# Altium footprint library Miscellaneous Connectors.PcbLib: 245 footprints (part 13 of 16)
Each footprint in its own frame and in the unit in brackets; x right, y up, seen from the top. Pads: shape width x height; smd on the part's side, far side on the other; paste and mask are expansions set on the pad; w line width, h text height; cw(c..) or ccw(c..) is an arc to the next point about the centre after c.
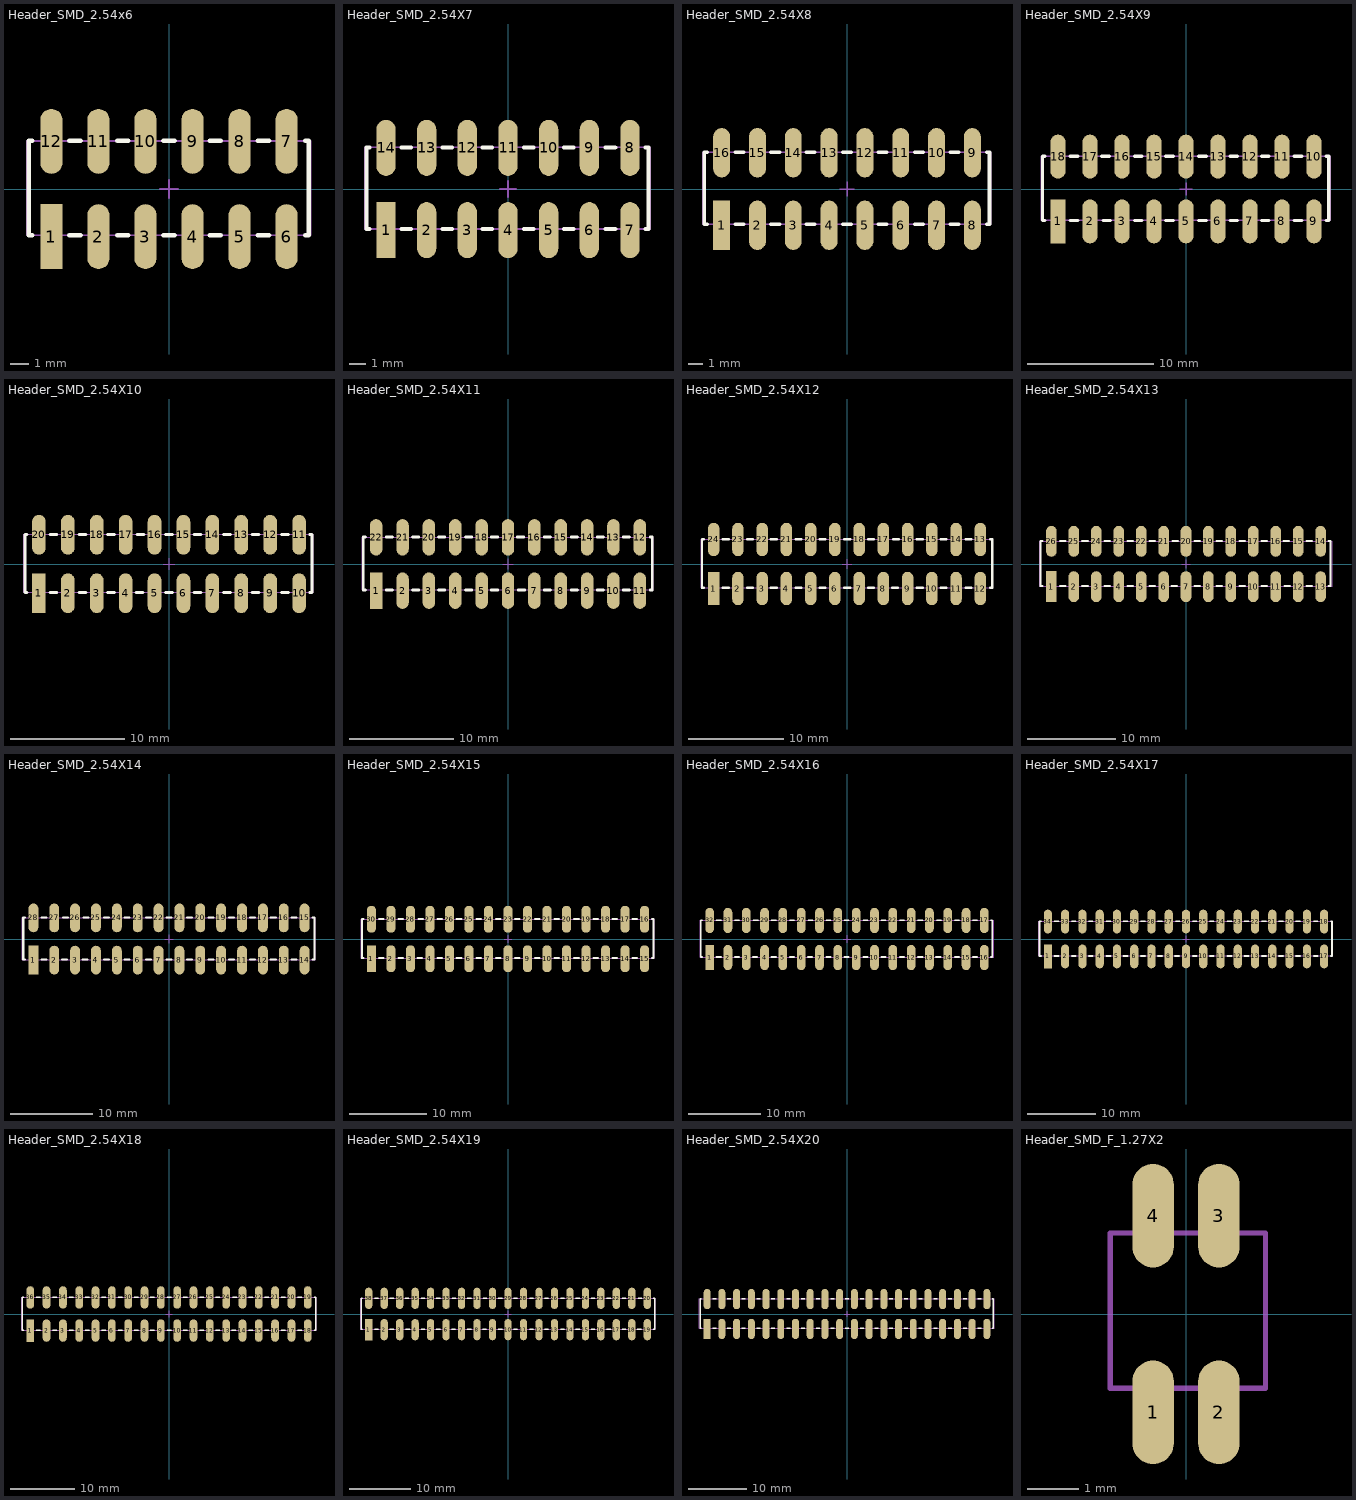
[diagram p12: the footprints below, top view; thin cyan lines are the x and y axes]

## Header_SMD_2.54x6 [mm]
pads (12):
  rect 1.2x3.5 smd: 1(-6.35,-2.57)
  oval 1.2x3.5 smd: 2(-3.81,-2.57) 3(-1.27,-2.57) 4(1.27,-2.57) 5(3.81,-2.57) 6(6.35,-2.57) 7(6.35,2.57) 8(3.81,2.57) 9(1.27,2.57) 10(-1.27,2.57) 11(-3.81,2.57) 12(-6.35,2.57)
Top Overlay:
  lines w0.254: -7.38,-2.5 -7.58,-2.5 ; -7.38,2.6 -7.58,2.6 ; -5.38,-2.5 -4.78,-2.5 ; -5.38,2.6 -4.78,2.6 ; -2.8,-2.5 -2.2,-2.5 ; -2.8,2.6 -2.2,2.6 ; -0.3,-2.5 0.3,-2.5 ; -0.3,2.6 0.3,2.6 ; 2.2,-2.5 2.8,-2.5 ; 2.2,2.6 2.8,2.6 ; 4.8,-2.5 5.4,-2.5 ; 4.8,2.6 5.4,2.6 ; 7.35,-2.5 7.55,-2.5 7.55,2.6 7.35,2.6 ; -7.58,-2.5 -7.58,-2.5 ; -7.58,-2.5 -7.58,2.6 ; -7.58,2.6 -7.58,2.6
Mechanical 15:
  lines w0.1: -0.5,0 0.5,0 ; 0,-0.5 0,0.5 ; -7.68,-2.5 -7.68,2.6 7.65,2.6 7.65,-2.5 -7.68,-2.5
3D body: height 9.7, standoff -0.04, extent -7.66,-3.75 7.58,3.75

## Header_SMD_2.54X7 [mm]
pads (14):
  rect 1.2x3.5 smd: 1(-7.62,-2.57)
  oval 1.2x3.5 smd: 2(-5.08,-2.57) 3(-2.54,-2.57) 4(0,-2.57) 5(2.54,-2.57) 6(5.08,-2.57) 7(7.62,-2.57) 8(7.62,2.57) 9(5.08,2.57) 10(2.54,2.57) 11(0,2.57) 12(-2.54,2.57) 13(-5.08,2.57) 14(-7.62,2.57)
Top Overlay:
  lines w0.254: -8.65,-2.5 -8.85,-2.5 ; -8.65,2.6 -8.85,2.6 ; -6.65,-2.5 -6.05,-2.5 ; -6.65,2.6 -6.05,2.6 ; -4.1,-2.5 -3.5,-2.5 ; -4.1,2.6 -3.5,2.6 ; -1.6,-2.5 -1,-2.5 ; -1.6,2.6 -1,2.6 ; 1,-2.5 1.6,-2.5 ; 1,2.6 1.6,2.6 ; 3.5,-2.5 4.1,-2.5 ; 3.5,2.6 4.1,2.6 ; 6.1,-2.5 6.7,-2.5 ; 6.1,2.6 6.7,2.6 ; 8.58,-2.5 8.78,-2.5 8.78,2.6 8.58,2.6 ; -8.85,-2.5 -8.85,-2.5 ; -8.85,-2.5 -8.85,2.6 ; -8.85,2.6 -8.85,2.6
Mechanical 15:
  lines w0.1: -0.5,0 0.5,0 ; 0,-0.5 0,0.5 ; -8.95,-2.5 -8.95,2.6 8.88,2.6 8.88,-2.5 -8.95,-2.5
3D body: height 9.7, standoff -0.04, extent -8.93,-3.75 8.85,3.75

## Header_SMD_2.54X8 [mm]
pads (16):
  rect 1.2x3.5 smd: 1(-8.89,-2.57)
  oval 1.2x3.5 smd: 2(-6.35,-2.57) 3(-3.81,-2.57) 4(-1.27,-2.57) 5(1.27,-2.57) 6(3.81,-2.57) 7(6.35,-2.57) 8(8.89,-2.57) 9(8.89,2.57) 10(6.35,2.57) 11(3.81,2.57) 12(1.27,2.57) 13(-1.27,2.57) 14(-3.81,2.57) 15(-6.35,2.57) 16(-8.89,2.57)
Top Overlay:
  lines w0.254: -9.92,-2.5 -10.12,-2.5 ; -9.92,2.6 -10.12,2.6 ; -7.92,-2.5 -7.32,-2.5 ; -7.92,2.6 -7.32,2.6 ; -5.39,-2.5 -4.79,-2.5 ; -5.39,2.6 -4.79,2.6 ; -2.89,-2.5 -2.29,-2.5 ; -2.89,2.6 -2.29,2.6 ; -0.29,-2.5 0.31,-2.5 ; -0.29,2.6 0.31,2.6 ; 2.21,-2.5 2.81,-2.5 ; 2.21,2.6 2.81,2.6 ; 4.81,-2.5 5.41,-2.5 ; 4.81,2.6 5.41,2.6 ; 7.31,-2.5 7.91,-2.5 ; 7.31,2.6 7.91,2.6 ; 9.91,-2.5 10.11,-2.5 10.11,2.6 9.91,2.6 ; -10.12,-2.5 -10.12,-2.5 ; -10.12,-2.5 -10.12,2.6 ; -10.12,2.6 -10.12,2.6
Mechanical 15:
  lines w0.1: -0.5,0 0.5,0 ; 0,-0.5 0,0.5 ; -10.22,-2.5 -10.22,2.6 10.21,2.6 10.21,-2.5 -10.22,-2.5
3D body: height 9.7, standoff -0.04, extent -10.2,-3.75 10.12,3.75

## Header_SMD_2.54X9 [mm]
pads (18):
  rect 1.2x3.5 smd: 1(-10.16,-2.57)
  oval 1.2x3.5 smd: 2(-7.62,-2.57) 3(-5.08,-2.57) 4(-2.54,-2.57) 5(0,-2.57) 6(2.54,-2.57) 7(5.08,-2.57) 8(7.62,-2.57) 9(10.16,-2.57) 10(10.16,2.57) 11(7.62,2.57) 12(5.08,2.57) 13(2.54,2.57) 14(0,2.57) 15(-2.54,2.57) 16(-5.08,2.57) 17(-7.62,2.57) 18(-10.16,2.57)
Top Overlay:
  lines w0.254: -11.19,-2.5 -11.39,-2.5 ; -11.19,2.6 -11.39,2.6 ; -9.19,-2.5 -8.59,-2.5 ; -9.19,2.6 -8.59,2.6 ; -6.7,2.6 -6.1,2.6 ; -6.6,-2.5 -6,-2.5 ; -4.1,-2.5 -3.5,-2.5 ; -4.1,2.6 -3.5,2.6 ; -1.6,-2.5 -1,-2.5 ; -1.6,2.6 -1,2.6 ; 1,-2.5 1.6,-2.5 ; 1,2.6 1.6,2.6 ; 3.5,-2.5 4.1,-2.5 ; 3.5,2.6 4.1,2.6 ; 6,-2.5 6.6,-2.5 ; 6,2.6 6.6,2.6 ; 8.6,-2.5 9.2,-2.5 ; 8.6,2.6 9.2,2.6 ; 11.14,-2.5 11.34,-2.5 11.34,2.6 11.14,2.6 ; -11.39,-2.5 -11.39,-2.5 ; -11.39,-2.5 -11.39,2.6 ; -11.39,2.6 -11.39,2.6
Mechanical 15:
  lines w0.1: -0.5,0 0.5,0 ; 0,-0.5 0,0.5 ; -11.49,-2.5 -11.49,2.6 11.44,2.6 11.44,-2.5 -11.49,-2.5
3D body: height 9.7, standoff -0.04, extent -11.47,-3.75 11.39,3.75

## Header_SMD_2.54X10 [mm]
pads (20):
  rect 1.2x3.5 smd: 1(-11.43,-2.57)
  oval 1.2x3.5 smd: 2(-8.89,-2.57) 3(-6.35,-2.57) 4(-3.81,-2.57) 5(-1.27,-2.57) 6(1.27,-2.57) 7(3.81,-2.57) 8(6.35,-2.57) 9(8.89,-2.57) 10(11.43,-2.57) 11(11.43,2.57) 12(8.89,2.57) 13(6.35,2.57) 14(3.81,2.57) 15(1.27,2.57) 16(-1.27,2.57) 17(-3.81,2.57) 18(-6.35,2.57) 19(-8.89,2.57) 20(-11.43,2.57)
Top Overlay:
  lines w0.254: -12.46,-2.5 -12.66,-2.5 ; -12.46,2.6 -12.66,2.6 ; -10.46,-2.5 -9.86,-2.5 ; -10.46,2.6 -9.86,2.6 ; -7.9,-2.5 -7.3,-2.5 ; -7.9,2.6 -7.3,2.6 ; -5.4,-2.5 -4.8,-2.5 ; -5.4,2.6 -4.8,2.6 ; -2.9,-2.5 -2.3,-2.5 ; -2.8,2.6 -2.2,2.6 ; -0.3,-2.5 0.3,-2.5 ; -0.3,2.6 0.3,2.6 ; 2.2,-2.5 2.8,-2.5 ; 2.2,2.6 2.8,2.6 ; 4.8,-2.5 5.4,-2.5 ; 4.8,2.6 5.4,2.6 ; 7.3,-2.5 7.9,-2.5 ; 7.3,2.6 7.9,2.6 ; 9.9,-2.5 10.5,-2.5 ; 9.9,2.6 10.5,2.6 ; 12.37,-2.5 12.57,-2.5 12.57,2.6 12.37,2.6 ; -12.66,-2.5 -12.66,2.6 ; -12.66,-2.5 -12.66,-2.5 ; -12.66,2.6 -12.66,2.6
Mechanical 15:
  lines w0.1: -0.5,0 0.5,0 ; 0,-0.5 0,0.5 ; -12.76,-2.5 12.67,-2.5 12.67,2.6 -12.76,2.6 -12.76,-2.5
3D body: height 9.7, standoff -0.04, extent -12.74,-3.75 12.66,3.75

## Header_SMD_2.54X11 [mm]
pads (22):
  rect 1.2x3.5 smd: 1(-12.7,-2.57)
  oval 1.2x3.5 smd: 2(-10.16,-2.57) 3(-7.62,-2.57) 4(-5.08,-2.57) 5(-2.54,-2.57) 6(0,-2.57) 7(2.54,-2.57) 8(5.08,-2.57) 9(7.62,-2.57) 10(10.16,-2.57) 11(12.7,-2.57) 12(12.7,2.57) 13(10.16,2.57) 14(7.62,2.57) 15(5.08,2.57) 16(2.54,2.57) 17(0,2.57) 18(-2.54,2.57) 19(-5.08,2.57) 20(-7.62,2.57) 21(-10.16,2.57) 22(-12.7,2.57)
Top Overlay:
  lines w0.254: -13.73,-2.5 -13.93,-2.5 ; -13.73,2.6 -13.93,2.6 ; -11.73,-2.5 -11.13,-2.5 ; -11.73,2.6 -11.13,2.6 ; -9.2,-2.5 -8.6,-2.5 ; -9.2,2.6 -8.6,2.6 ; -6.7,-2.5 -6.1,-2.5 ; -6.7,2.6 -6.1,2.6 ; -4.1,-2.5 -3.5,-2.5 ; -4.1,2.6 -3.5,2.6 ; -1.6,-2.5 -1,-2.5 ; -1.6,2.6 -1,2.6 ; 0.9,2.6 1.5,2.6 ; 1,-2.5 1.6,-2.5 ; 3.5,-2.5 4.1,-2.5 ; 3.5,2.6 4.1,2.6 ; 6.1,-2.5 6.7,-2.5 ; 6.1,2.6 6.7,2.6 ; 8.6,-2.5 9.2,-2.5 ; 8.6,2.6 9.2,2.6 ; 11.1,-2.5 11.7,-2.5 ; 11.1,2.6 11.7,2.6 ; 13.7,-2.5 13.9,-2.5 13.9,2.6 13.7,2.6 ; -13.93,-2.5 -13.93,-2.5 ; -13.93,-2.5 -13.93,2.6 ; -13.93,2.6 -13.93,2.6
Mechanical 15:
  lines w0.1: -0.5,0 0.5,0 ; 0,-0.5 0,0.5 ; -14.03,-2.5 -14.03,2.6 14,2.6 14,-2.5 -14.03,-2.5
3D body: height 9.7, standoff -0.04, extent -14.01,-3.75 13.93,3.75

## Header_SMD_2.54X12 [mm]
pads (24):
  rect 1.2x3.5 smd: 1(-13.97,-2.57)
  oval 1.2x3.5 smd: 2(-11.43,-2.57) 3(-8.89,-2.57) 4(-6.35,-2.57) 5(-3.81,-2.57) 6(-1.27,-2.57) 7(1.27,-2.57) 8(3.81,-2.57) 9(6.35,-2.57) 10(8.89,-2.57) 11(11.43,-2.57) 12(13.97,-2.57) 13(13.97,2.57) 14(11.43,2.57) 15(8.89,2.57) 16(6.35,2.57) 17(3.81,2.57) 18(1.27,2.57) 19(-1.27,2.57) 20(-3.81,2.57) 21(-6.35,2.57) 22(-8.89,2.57) 23(-11.43,2.57) 24(-13.97,2.57)
Top Overlay:
  lines w0.254: -15,-2.5 -15.2,-2.5 ; -15,2.6 -15.2,2.6 ; -13,-2.5 -12.4,-2.5 ; -13,2.6 -12.4,2.6 ; -10.47,-2.5 -9.87,-2.5 ; -10.47,2.6 -9.87,2.6 ; -7.97,-2.5 -7.37,-2.5 ; -7.97,2.6 -7.37,2.6 ; -5.37,-2.5 -4.77,-2.5 ; -5.37,2.6 -4.77,2.6 ; -2.87,-2.5 -2.27,-2.5 ; -2.87,2.6 -2.27,2.6 ; -0.27,-2.5 0.33,-2.5 ; -0.27,2.6 0.33,2.6 ; 2.23,-2.5 2.83,-2.5 ; 2.23,2.6 2.83,2.6 ; 4.73,-2.5 5.33,-2.5 ; 4.83,2.6 5.43,2.6 ; 7.33,-2.5 7.93,-2.5 ; 7.33,2.6 7.93,2.6 ; 9.83,-2.5 10.43,-2.5 ; 9.83,2.6 10.43,2.6 ; 12.43,-2.5 13.03,-2.5 ; 12.43,2.6 13.03,2.6 ; 15.03,-2.5 15.23,-2.5 15.23,2.6 15.03,2.6 ; -15.2,-2.5 -15.2,2.6 ; -15.2,-2.5 -15.2,-2.5 ; -15.2,2.6 -15.2,2.6
Mechanical 15:
  lines w0.1: -0.5,0 0.5,0 ; 0,-0.5 0,0.5 ; -15.3,-2.5 15.23,-2.5 15.23,2.6 -15.3,2.6 -15.3,-2.5
3D body: height 9.7, standoff -0.04, extent -15.28,-3.75 15.2,3.75

## Header_SMD_2.54X13 [mm]
pads (26):
  rect 1.2x3.5 smd: 1(-15.24,-2.57)
  oval 1.2x3.5 smd: 2(-12.7,-2.57) 3(-10.16,-2.57) 4(-7.62,-2.57) 5(-5.08,-2.57) 6(-2.54,-2.57) 7(0,-2.57) 8(2.54,-2.57) 9(5.08,-2.57) 10(7.62,-2.57) 11(10.16,-2.57) 12(12.7,-2.57) 13(15.24,-2.57) 14(15.24,2.57) 15(12.7,2.57) 16(10.16,2.57) 17(7.62,2.57) 18(5.08,2.57) 19(2.54,2.57) 20(0,2.57) 21(-2.54,2.57) 22(-5.08,2.57) 23(-7.62,2.57) 24(-10.16,2.57) 25(-12.7,2.57) 26(-15.24,2.57)
Top Overlay:
  lines w0.254: -16.27,-2.5 -16.47,-2.5 ; -16.27,2.6 -16.47,2.6 ; -14.27,-2.5 -13.67,-2.5 ; -14.27,2.6 -13.67,2.6 ; -11.74,-2.5 -11.14,-2.5 ; -11.74,2.6 -11.14,2.6 ; -9.24,-2.5 -8.64,-2.5 ; -9.24,2.6 -8.64,2.6 ; -6.64,-2.5 -6.04,-2.5 ; -6.64,2.6 -6.04,2.6 ; -4.14,-2.5 -3.54,-2.5 ; -4.14,2.6 -3.54,2.6 ; -1.64,-2.5 -1.04,-2.5 ; -1.54,2.6 -0.94,2.6 ; 0.96,-2.5 1.56,-2.5 ; 0.96,2.6 1.56,2.6 ; 3.46,-2.5 4.06,-2.5 ; 3.46,2.6 4.06,2.6 ; 6.06,-2.5 6.66,-2.5 ; 6.06,2.6 6.66,2.6 ; 8.56,-2.5 9.16,-2.5 ; 8.56,2.6 9.16,2.6 ; 11.06,2.6 11.66,2.6 ; 11.16,-2.5 11.76,-2.5 ; 13.66,-2.5 14.26,-2.5 ; 13.66,2.6 14.26,2.6 ; 16.16,-2.5 16.36,-2.5 16.36,2.6 16.16,2.6 ; -16.47,-2.5 -16.47,-2.5 ; -16.47,-2.5 -16.47,2.6 ; -16.47,2.6 -16.47,2.6
Mechanical 15:
  lines w0.1: -0.5,0 0.5,0 ; 0,-0.5 0,0.5 ; -16.57,-2.5 -16.57,2.6 16.56,2.6 16.56,-2.5 -16.57,-2.5
3D body: height 9.7, standoff -0.04, extent -16.55,-3.75 16.47,3.75

## Header_SMD_2.54X14 [mm]
pads (28):
  rect 1.2x3.5 smd: 1(-16.51,-2.57)
  oval 1.2x3.5 smd: 2(-13.97,-2.57) 3(-11.43,-2.57) 4(-8.89,-2.57) 5(-6.35,-2.57) 6(-3.81,-2.57) 7(-1.27,-2.57) 8(1.27,-2.57) 9(3.81,-2.57) 10(6.35,-2.57) 11(8.89,-2.57) 12(11.43,-2.57) 13(13.97,-2.57) 14(16.51,-2.57) 15(16.51,2.57) 16(13.97,2.57) 17(11.43,2.57) 18(8.89,2.57) 19(6.35,2.57) 20(3.81,2.57) 21(1.27,2.57) 22(-1.27,2.57) 23(-3.81,2.57) 24(-6.35,2.57) 25(-8.89,2.57) 26(-11.43,2.57) 27(-13.97,2.57) 28(-16.51,2.57)
Top Overlay:
  lines w0.254: -17.54,-2.5 -17.74,-2.5 ; -17.54,2.6 -17.74,2.6 ; -15.54,-2.5 -14.94,-2.5 ; -15.54,2.6 -14.94,2.6 ; -13.01,-2.5 -12.41,-2.5 ; -12.91,2.6 -12.31,2.6 ; -10.51,-2.5 -9.91,-2.5 ; -10.41,2.6 -9.81,2.6 ; -7.91,-2.5 -7.31,-2.5 ; -7.91,2.6 -7.31,2.6 ; -5.41,-2.5 -4.81,-2.5 ; -5.41,2.6 -4.81,2.6 ; -2.81,-2.5 -2.21,-2.5 ; -2.81,2.6 -2.21,2.6 ; -0.31,-2.5 0.29,-2.5 ; -0.31,2.6 0.29,2.6 ; 2.19,-2.5 2.79,-2.5 ; 2.19,2.6 2.79,2.6 ; 4.79,-2.5 5.39,-2.5 ; 4.79,2.6 5.39,2.6 ; 7.29,-2.5 7.89,-2.5 ; 7.29,2.6 7.89,2.6 ; 9.89,-2.5 10.49,-2.5 ; 9.89,2.6 10.49,2.6 ; 12.39,-2.5 12.99,-2.5 ; 12.39,2.6 12.99,2.6 ; 14.89,-2.5 15.49,-2.5 ; 14.89,2.6 15.49,2.6 ; 17.49,-2.5 17.69,-2.5 17.69,2.6 17.49,2.6 ; -17.74,-2.5 -17.74,-2.5 ; -17.74,-2.5 -17.74,2.6 ; -17.74,2.6 -17.74,2.6
Mechanical 15:
  lines w0.1: -0.5,0 0.5,0 ; 0,-0.5 0,0.5 ; -17.84,-2.5 -17.84,2.6 17.79,2.6 17.79,-2.5 -17.84,-2.5
3D body: height 9.7, standoff -0.04, extent -17.82,-3.75 17.74,3.75

## Header_SMD_2.54X15 [mm]
pads (30):
  rect 1.2x3.5 smd: 1(-17.78,-2.57)
  oval 1.2x3.5 smd: 2(-15.24,-2.57) 3(-12.7,-2.57) 4(-10.16,-2.57) 5(-7.62,-2.57) 6(-5.08,-2.57) 7(-2.54,-2.57) 8(0,-2.57) 9(2.54,-2.57) 10(5.08,-2.57) 11(7.62,-2.57) 12(10.16,-2.57) 13(12.7,-2.57) 14(15.24,-2.57) 15(17.78,-2.57) 16(17.78,2.57) 17(15.24,2.57) 18(12.7,2.57) 19(10.16,2.57) 20(7.62,2.57) 21(5.08,2.57) 22(2.54,2.57) 23(0,2.57) 24(-2.54,2.57) 25(-5.08,2.57) 26(-7.62,2.57) 27(-10.16,2.57) 28(-12.7,2.57) 29(-15.24,2.57) 30(-17.78,2.57)
Top Overlay:
  lines w0.254: -18.81,-2.5 -19.01,-2.5 ; -18.81,2.6 -19.01,2.6 ; -16.81,-2.5 -16.21,-2.5 ; -16.81,2.6 -16.21,2.6 ; -14.28,-2.5 -13.68,-2.5 ; -14.28,2.6 -13.68,2.6 ; -11.78,-2.5 -11.18,-2.5 ; -11.68,2.6 -11.08,2.6 ; -9.18,-2.5 -8.58,-2.5 ; -9.18,2.6 -8.58,2.6 ; -6.68,-2.5 -6.08,-2.5 ; -6.68,2.6 -6.08,2.6 ; -4.08,-2.5 -3.48,-2.5 ; -4.08,2.6 -3.48,2.6 ; -1.58,-2.5 -0.98,-2.5 ; -1.58,2.6 -0.98,2.6 ; 0.92,-2.5 1.52,-2.5 ; 0.92,2.6 1.52,2.6 ; 3.52,-2.5 4.12,-2.5 ; 3.52,2.6 4.12,2.6 ; 6.02,-2.5 6.62,-2.5 ; 6.02,2.6 6.62,2.6 ; 8.62,-2.5 9.22,-2.5 ; 8.62,2.6 9.22,2.6 ; 11.12,-2.5 11.72,-2.5 ; 11.12,2.6 11.72,2.6 ; 13.62,-2.5 14.22,-2.5 ; 13.62,2.6 14.22,2.6 ; 16.22,-2.5 16.82,-2.5 ; 16.22,2.6 16.82,2.6 ; 18.72,-2.5 18.92,-2.5 18.92,2.6 18.72,2.6 ; -19.01,-2.5 -19.01,2.6 ; -19.01,-2.5 -19.01,-2.5 ; -19.01,2.6 -19.01,2.6
Mechanical 15:
  lines w0.1: -0.5,0 0.5,0 ; 0,-0.5 0,0.5 ; -19.11,-2.5 19.02,-2.5 19.02,2.6 -19.11,2.6 -19.11,-2.5
3D body: height 9.7, standoff -0.04, extent -19.09,-3.75 19.01,3.75

## Header_SMD_2.54X16 [mm]
pads (32):
  rect 1.2x3.5 smd: 1(-19.05,-2.57)
  oval 1.2x3.5 smd: 2(-16.51,-2.57) 3(-13.97,-2.57) 4(-11.43,-2.57) 5(-8.89,-2.57) 6(-6.35,-2.57) 7(-3.81,-2.57) 8(-1.27,-2.57) 9(1.27,-2.57) 10(3.81,-2.57) 11(6.35,-2.57) 12(8.89,-2.57) 13(11.43,-2.57) 14(13.97,-2.57) 15(16.51,-2.57) 16(19.05,-2.57) 17(19.05,2.57) 18(16.51,2.57) 19(13.97,2.57) 20(11.43,2.57) 21(8.89,2.57) 22(6.35,2.57) 23(3.81,2.57) 24(1.27,2.57) 25(-1.27,2.57) 26(-3.81,2.57) 27(-6.35,2.57) 28(-8.89,2.57) 29(-11.43,2.57) 30(-13.97,2.57) 31(-16.51,2.57) 32(-19.05,2.57)
Top Overlay:
  lines w0.254: -20.08,-2.5 -20.28,-2.5 ; -20.08,2.6 -20.28,2.6 ; -18.08,-2.5 -17.48,-2.5 ; -18.08,2.6 -17.48,2.6 ; -15.55,-2.5 -14.95,-2.5 ; -15.55,2.6 -14.95,2.6 ; -13.05,-2.5 -12.45,-2.5 ; -12.95,2.6 -12.35,2.6 ; -10.45,-2.5 -9.85,-2.5 ; -10.45,2.6 -9.85,2.6 ; -7.95,-2.5 -7.35,-2.5 ; -7.95,2.6 -7.35,2.6 ; -5.45,-2.5 -4.85,-2.5 ; -5.35,2.6 -4.75,2.6 ; -2.85,-2.5 -2.25,-2.5 ; -2.85,2.6 -2.25,2.6 ; -0.35,-2.5 0.25,-2.5 ; -0.35,2.6 0.25,2.6 ; 2.25,-2.5 2.85,-2.5 ; 2.25,2.6 2.85,2.6 ; 4.75,-2.5 5.35,-2.5 ; 4.75,2.6 5.35,2.6 ; 7.35,-2.5 7.95,-2.5 ; 7.35,2.6 7.95,2.6 ; 9.85,-2.5 10.45,-2.5 ; 9.85,2.6 10.45,2.6 ; 12.35,-2.5 12.95,-2.5 ; 12.45,2.6 13.05,2.6 ; 14.95,-2.5 15.55,-2.5 ; 14.95,2.6 15.55,2.6 ; 17.45,-2.5 18.05,-2.5 ; 17.45,2.6 18.05,2.6 ; 19.95,-2.5 20.15,-2.5 20.15,2.6 19.95,2.6 ; -20.28,-2.5 -20.28,-2.5 ; -20.28,-2.5 -20.28,2.6 ; -20.28,2.6 -20.28,2.6
Mechanical 15:
  lines w0.1: -0.5,0 0.5,0 ; 0,-0.5 0,0.5 ; -20.38,-2.5 -20.38,2.6 20.35,2.6 20.35,-2.5 -20.38,-2.5
3D body: height 9.7, standoff -0.04, extent -20.36,-3.75 20.28,3.75

## Header_SMD_2.54X17 [mm]
pads (34):
  rect 1.2x3.5 smd: 1(-20.32,-2.57)
  oval 1.2x3.5 smd: 2(-17.78,-2.57) 3(-15.24,-2.57) 4(-12.7,-2.57) 5(-10.16,-2.57) 6(-7.62,-2.57) 7(-5.08,-2.57) 8(-2.54,-2.57) 9(0,-2.57) 10(2.54,-2.57) 11(5.08,-2.57) 12(7.62,-2.57) 13(10.16,-2.57) 14(12.7,-2.57) 15(15.24,-2.57) 16(17.78,-2.57) 17(20.32,-2.57) 18(20.32,2.57) 19(17.78,2.57) 20(15.24,2.57) 21(12.7,2.57) 22(10.16,2.57) 23(7.62,2.57) 24(5.08,2.57) 25(2.54,2.57) 26(0,2.57) 27(-2.54,2.57) 28(-5.08,2.57) 29(-7.62,2.57) 30(-10.16,2.57) 31(-12.7,2.57) 32(-15.24,2.57) 33(-17.78,2.57) 34(-20.32,2.57)
Top Overlay:
  lines w0.254: -21.35,-2.5 -21.55,-2.5 ; -21.35,2.6 -21.55,2.6 ; -19.35,-2.5 -18.75,-2.5 ; -19.35,2.6 -18.75,2.6 ; -16.82,-2.5 -16.22,-2.5 ; -16.82,2.6 -16.22,2.6 ; -14.32,-2.5 -13.72,-2.5 ; -14.32,2.6 -13.72,2.6 ; -11.72,-2.5 -11.12,-2.5 ; -11.72,2.6 -11.12,2.6 ; -9.22,-2.5 -8.62,-2.5 ; -9.22,2.6 -8.62,2.6 ; -6.62,-2.5 -6.02,-2.5 ; -6.62,2.6 -6.02,2.6 ; -4.12,-2.5 -3.52,-2.5 ; -4.12,2.6 -3.52,2.6 ; -1.62,-2.5 -1.02,-2.5 ; -1.52,2.6 -0.92,2.6 ; 0.98,-2.5 1.58,-2.5 ; 0.98,2.6 1.58,2.6 ; 3.48,-2.5 4.08,-2.5 ; 3.48,2.6 4.08,2.6 ; 6.08,-2.5 6.68,-2.5 ; 6.08,2.6 6.68,2.6 ; 8.58,-2.5 9.18,-2.5 ; 8.58,2.6 9.18,2.6 ; 11.18,-2.5 11.78,-2.5 ; 11.18,2.6 11.78,2.6 ; 13.68,-2.5 14.28,-2.5 ; 13.68,2.6 14.28,2.6 ; 16.18,-2.5 16.78,-2.5 ; 16.18,2.6 16.78,2.6 ; 18.78,-2.5 19.38,-2.5 ; 18.78,2.6 19.38,2.6 ; 21.28,-2.5 21.48,-2.5 21.48,2.6 21.28,2.6 ; -21.55,-2.5 -21.55,2.6 ; -21.55,-2.5 -21.55,-2.5 ; -21.55,2.6 -21.55,2.6
Mechanical 15:
  lines w0.1: -0.5,0 0.5,0 ; 0,-0.5 0,0.5 ; -21.65,-2.5 21.58,-2.5 21.58,2.6 -21.65,2.6 -21.65,-2.5
3D body: height 9.7, standoff -0.04, extent -21.63,-3.75 21.55,3.75

## Header_SMD_2.54X18 [mm]
pads (36):
  rect 1.2x3.5 smd: 1(-21.59,-2.57)
  oval 1.2x3.5 smd: 2(-19.05,-2.57) 3(-16.51,-2.57) 4(-13.97,-2.57) 5(-11.43,-2.57) 6(-8.89,-2.57) 7(-6.35,-2.57) 8(-3.81,-2.57) 9(-1.27,-2.57) 10(1.27,-2.57) 11(3.81,-2.57) 12(6.35,-2.57) 13(8.89,-2.57) 14(11.43,-2.57) 15(13.97,-2.57) 16(16.51,-2.57) 17(19.05,-2.57) 18(21.59,-2.57) 19(21.59,2.57) 20(19.05,2.57) 21(16.51,2.57) 22(13.97,2.57) 23(11.43,2.57) 24(8.89,2.57) 25(6.35,2.57) 26(3.81,2.57) 27(1.27,2.57) 28(-1.27,2.57) 29(-3.81,2.57) 30(-6.35,2.57) 31(-8.89,2.57) 32(-11.43,2.57) 33(-13.97,2.57) 34(-16.51,2.57) 35(-19.05,2.57) 36(-21.59,2.57)
Top Overlay:
  lines w0.254: -22.62,-2.5 -22.82,-2.5 ; -22.62,2.6 -22.82,2.6 ; -20.62,-2.5 -20.02,-2.5 ; -20.62,2.6 -20.02,2.6 ; -18.09,-2.5 -17.49,-2.5 ; -18.09,2.6 -17.49,2.6 ; -15.49,-2.5 -14.89,-2.5 ; -15.49,2.6 -14.89,2.6 ; -12.99,-2.5 -12.39,-2.5 ; -12.99,2.6 -12.39,2.6 ; -10.49,-2.5 -9.89,-2.5 ; -10.49,2.6 -9.89,2.6 ; -7.89,-2.5 -7.29,-2.5 ; -7.89,2.6 -7.29,2.6 ; -5.39,-2.5 -4.79,-2.5 ; -5.39,2.6 -4.79,2.6 ; -2.89,-2.5 -2.29,-2.5 ; -2.89,2.6 -2.29,2.6 ; -0.29,-2.5 0.31,-2.5 ; -0.29,2.6 0.31,2.6 ; 2.21,-2.5 2.81,-2.5 ; 2.21,2.6 2.81,2.6 ; 4.81,-2.5 5.41,-2.5 ; 4.81,2.6 5.41,2.6 ; 7.31,-2.5 7.91,-2.5 ; 7.31,2.6 7.91,2.6 ; 9.81,-2.5 10.41,-2.5 ; 9.91,2.6 10.51,2.6 ; 12.41,-2.5 13.01,-2.5 ; 12.41,2.6 13.01,2.6 ; 14.91,-2.5 15.51,-2.5 ; 14.91,2.6 15.51,2.6 ; 17.51,-2.5 18.11,-2.5 ; 17.51,2.6 18.11,2.6 ; 20.01,-2.5 20.61,-2.5 ; 20.01,2.6 20.61,2.6 ; 22.61,-2.5 22.81,-2.5 22.81,2.6 22.61,2.6 ; -22.82,-2.5 -22.82,2.6 ; -22.82,-2.5 -22.82,-2.5 ; -22.82,2.6 -22.82,2.6
Mechanical 15:
  lines w0.1: -0.5,0 0.5,0 ; 0,-0.5 0,0.5 ; -22.92,-2.5 22.91,-2.5 22.91,2.6 -22.92,2.6 -22.92,-2.5
3D body: height 9.7, standoff -0.04, extent -22.9,-3.75 22.82,3.75

## Header_SMD_2.54X19 [mm]
pads (38):
  rect 1.2x3.5 smd: 1(-22.86,-2.57)
  oval 1.2x3.5 smd: 2(-20.32,-2.57) 3(-17.78,-2.57) 4(-15.24,-2.57) 5(-12.7,-2.57) 6(-10.16,-2.57) 7(-7.62,-2.57) 8(-5.08,-2.57) 9(-2.54,-2.57) 10(0,-2.57) 11(2.54,-2.57) 12(5.08,-2.57) 13(7.62,-2.57) 14(10.16,-2.57) 15(12.7,-2.57) 16(15.24,-2.57) 17(17.78,-2.57) 18(20.32,-2.57) 19(22.86,-2.57) 20(22.86,2.57) 21(20.32,2.57) 22(17.78,2.57) 23(15.24,2.57) 24(12.7,2.57) 25(10.16,2.57) 26(7.62,2.57) 27(5.08,2.57) 28(2.54,2.57) 29(0,2.57) 30(-2.54,2.57) 31(-5.08,2.57) 32(-7.62,2.57) 33(-10.16,2.57) 34(-12.7,2.57) 35(-15.24,2.57) 36(-17.78,2.57) 37(-20.32,2.57) 38(-22.86,2.57)
Top Overlay:
  lines w0.254: -23.89,-2.5 -24.09,-2.5 ; -23.89,2.6 -24.09,2.6 ; -21.89,-2.5 -21.29,-2.5 ; -21.89,2.6 -21.29,2.6 ; -19.36,-2.5 -18.76,-2.5 ; -19.36,2.6 -18.76,2.6 ; -16.86,2.6 -16.26,2.6 ; -16.76,-2.5 -16.16,-2.5 ; -14.26,-2.5 -13.66,-2.5 ; -14.26,2.6 -13.66,2.6 ; -11.76,-2.5 -11.16,-2.5 ; -11.76,2.6 -11.16,2.6 ; -9.26,-2.5 -8.66,-2.5 ; -9.16,2.6 -8.56,2.6 ; -6.66,-2.5 -6.06,-2.5 ; -6.66,2.6 -6.06,2.6 ; -4.16,-2.5 -3.56,-2.5 ; -4.06,2.6 -3.46,2.6 ; -1.56,-2.5 -0.96,-2.5 ; -1.56,2.6 -0.96,2.6 ; 0.94,-2.5 1.54,-2.5 ; 0.94,2.6 1.54,2.6 ; 3.54,-2.5 4.14,-2.5 ; 3.54,2.6 4.14,2.6 ; 6.04,-2.5 6.64,-2.5 ; 6.04,2.6 6.64,2.6 ; 8.64,-2.5 9.24,-2.5 ; 8.64,2.6 9.24,2.6 ; 11.14,-2.5 11.74,-2.5 ; 11.14,2.6 11.74,2.6 ; 13.64,-2.5 14.24,-2.5 ; 13.64,2.6 14.24,2.6 ; 16.24,-2.5 16.84,-2.5 ; 16.24,2.6 16.84,2.6 ; 18.74,-2.5 19.34,-2.5 ; 18.74,2.6 19.34,2.6 ; 21.24,-2.5 21.84,-2.5 ; 21.34,2.6 21.94,2.6 ; 23.84,-2.5 24.04,-2.5 24.04,2.6 23.84,2.6 ; -24.09,-2.5 -24.09,-2.5 ; -24.09,-2.5 -24.09,2.6 ; -24.09,2.6 -24.09,2.6
Mechanical 15:
  lines w0.1: -0.5,0 0.5,0 ; 0,-0.5 0,0.5 ; -24.19,-2.5 -24.19,2.6 24.14,2.6 24.14,-2.5 -24.19,-2.5
3D body: height 9.7, standoff -0.04, extent -24.17,-3.75 24.09,3.75

## Header_SMD_2.54X20 [mm]
pads (40):
  rect 1.2x3.5 smd: 1(-24.13,-2.57)
  oval 1.2x3.5 smd: 2(-21.59,-2.57) 3(-19.05,-2.57) 4(-16.51,-2.57) 5(-13.97,-2.57) 6(-11.43,-2.57) 7(-8.89,-2.57) 8(-6.35,-2.57) 9(-3.81,-2.57) 10(-1.27,-2.57) 11(1.27,-2.57) 12(3.81,-2.57) 13(6.35,-2.57) 14(8.89,-2.57) 15(11.43,-2.57) 16(13.97,-2.57) 17(16.51,-2.57) 18(19.05,-2.57) 19(21.59,-2.57) 20(24.13,-2.57) 21(24.13,2.57) 22(21.59,2.57) 23(19.05,2.57) 24(16.51,2.57) 25(13.97,2.57) 26(11.43,2.57) 27(8.89,2.57) 28(6.35,2.57) 29(3.81,2.57) 30(1.27,2.57) 31(-1.27,2.57) 32(-3.81,2.57) 33(-6.35,2.57) 34(-8.89,2.57) 35(-11.43,2.57) 36(-13.97,2.57) 37(-16.51,2.57) 38(-19.05,2.57) 39(-21.59,2.57) 40(-24.13,2.57)
Top Overlay:
  lines w0.254: -25.16,-2.5 -25.36,-2.5 ; -25.16,2.6 -25.36,2.6 ; -23.16,-2.5 -22.56,-2.5 ; -23.16,2.6 -22.56,2.6 ; -20.63,-2.5 -20.03,-2.5 ; -20.63,2.6 -20.03,2.6 ; -18.13,-2.5 -17.53,-2.5 ; -18.13,2.6 -17.53,2.6 ; -15.53,-2.5 -14.93,-2.5 ; -15.53,2.6 -14.93,2.6 ; -13.03,-2.5 -12.43,-2.5 ; -13.03,2.6 -12.43,2.6 ; -10.43,-2.5 -9.83,-2.5 ; -10.43,2.6 -9.83,2.6 ; -7.93,-2.5 -7.33,-2.5 ; -7.93,2.6 -7.33,2.6 ; -5.33,-2.5 -4.73,-2.5 ; -5.33,2.6 -4.73,2.6 ; -2.83,-2.5 -2.23,-2.5 ; -2.83,2.6 -2.23,2.6 ; -0.33,-2.5 0.27,-2.5 ; -0.33,2.6 0.27,2.6 ; 2.27,-2.5 2.87,-2.5 ; 2.27,2.6 2.87,2.6 ; 4.77,-2.5 5.37,-2.5 ; 4.77,2.6 5.37,2.6 ; 7.27,-2.5 7.87,-2.5 ; 7.27,2.6 7.87,2.6 ; 9.87,-2.5 10.47,-2.5 ; 9.87,2.6 10.47,2.6 ; 12.37,-2.5 12.97,-2.5 ; 12.37,2.6 12.97,2.6 ; 14.97,-2.5 15.57,-2.5 ; 14.97,2.6 15.57,2.6 ; 17.47,-2.5 18.07,-2.5 ; 17.47,2.6 18.07,2.6 ; 20.07,-2.5 20.67,-2.5 ; 20.07,2.6 20.67,2.6 ; 22.57,-2.5 23.17,-2.5 ; 22.57,2.6 23.17,2.6 ; 25.07,-2.5 25.27,-2.5 25.27,2.6 25.07,2.6 ; -25.36,-2.5 -25.36,2.6 ; -25.36,-2.5 -25.36,-2.5 ; -25.36,2.6 -25.36,2.6
Mechanical 15:
  lines w0.1: -0.5,0 0.5,0 ; 0,-0.5 0,0.5 ; -25.46,-2.5 25.37,-2.5 25.37,2.6 -25.46,2.6 -25.46,-2.5
3D body: height 9.7, standoff -0.04, extent -25.44,-3.75 25.36,3.75

## Header_SMD_F_1.27X2 [mm]
pads (4):
  oval 0.8x2 smd: 1(-0.635,-1.9) 2(0.635,-1.9) 3(0.635,1.9) 4(-0.635,1.9)
Mechanical 15:
  lines w0.1: -1.465,-1.435 -1.465,1.565 1.535,1.565 1.535,-1.435 -1.465,-1.435
3D body: height 4.5, standoff 0, extent -1.465,-2.335 1.535,2.265